# Altium footprint library 03458 401 X215.PcbLib: 1 footprints
Each footprint in its own frame and in the unit in brackets; x right, y up, seen from the top. Pads: shape width x height; smd on the part's side, far side on the other; paste and mask are expansions set on the pad; w line width, h text height; cw(c..) or ccw(c..) is an arc to the next point about the centre after c.
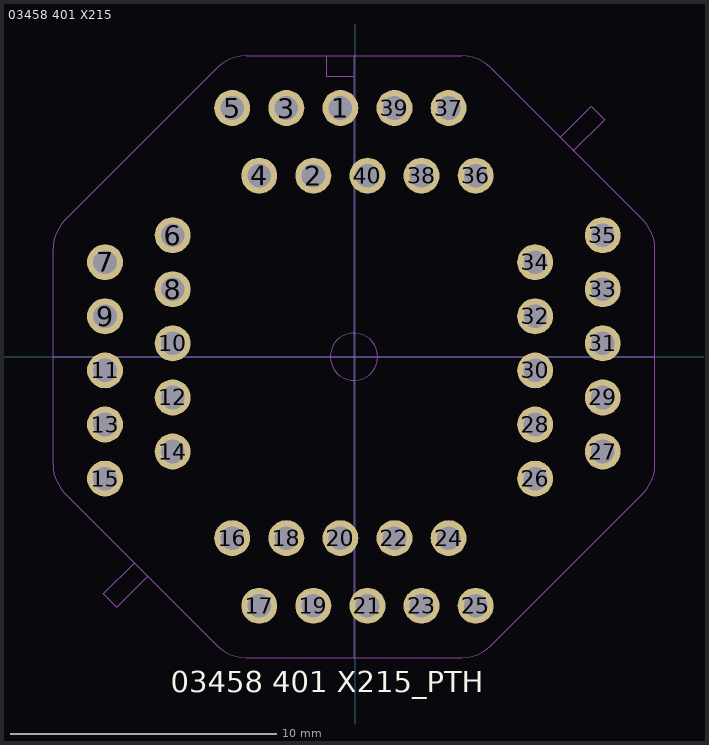
[diagram p0: the footprint, top view; thin cyan lines are the x and y axes]

## 03458 401 X215 [mil]
pads (40):
  round 53.15 hole 35: 1(-22,368) 2(-62,268) 3(-102,368) 4(-142,268) 5(-182,368) 6(-270,180) 7(-370,140) 8(-270,100) 9(-370,60) 10(-270,20) 11(-370,-20) 12(-270,-60) 13(-370,-100) 14(-270,-140) 15(-370,-180) 16(-182,-268) 17(-142,-368) 18(-102,-268) 19(-62,-368) 20(-22,-268) 21(18,-368) 22(58,-268) 23(98,-368) 24(138,-268) 25(178,-368) 26(266,-180) 27(366,-140) 28(266,-100) 29(366,-60) 30(266,-20) 31(366,20) 32(266,60) 33(366,100) 34(266,140) 35(366,180) 36(178,268) 37(138,368) 38(98,268) 39(58,368) 40(18,268)
Top Overlay:
  text "03458 401 X215_PTH" at -273.09,-495.85 h31.5
Mechanical 1:
  circle w0.5: c-369.88,-179.79 r17.5
  circle w0.5: c-369.88,-99.79 r17.5
  circle w0.5: c-369.88,-19.79 r17.5
  circle w0.5: c-369.88,60.21 r17.5
  circle w0.5: c-369.88,140.21 r17.5
  circle w0.5: c-269.88,-139.79 r17.5
  circle w0.5: c-269.88,-59.79 r17.5
  circle w0.5: c-269.88,20.21 r17.5
  circle w0.5: c-269.88,100.21 r17.5
  circle w0.5: c-269.88,180.21 r17.5
  circle w0.5: c-181.88,-267.79 r17.5
  circle w0.5: c-181.88,368.21 r17.5
  circle w0.5: c-141.88,268.21 r17.5
  circle w0.5: c-141.88,-367.79 r17.5
  circle w0.5: c-101.88,368.21 r17.5
  circle w0.5: c-101.88,-267.79 r17.5
  circle w0.5: c-61.88,268.21 r17.5
  circle w0.5: c-61.88,-367.79 r17.5
  circle w0.5: c-21.88,368.21 r17.5
  circle w0.5: c-21.88,-267.79 r17.5
  circle w0.5: c18.12,-367.79 r17.5
  circle w0.5: c18.12,268.21 r17.5
  circle w0.5: c58.12,-267.79 r17.5
  circle w0.5: c58.12,368.21 r17.5
  circle w0.5: c98.12,-367.79 r17.5
  circle w0.5: c98.12,268.21 r17.5
  circle w0.5: c138.12,-267.79 r17.5
  circle w0.5: c138.12,368.21 r17.5
  circle w0.5: c178.12,-367.79 r17.5
  circle w0.5: c178.12,268.21 r17.5
  circle w0.5: c266.12,140.21 r17.5
  circle w0.5: c266.12,60.21 r17.5
  circle w0.5: c266.12,-19.79 r17.5
  circle w0.5: c266.12,-99.79 r17.5
  circle w0.5: c266.12,-179.79 r17.5
  circle w0.5: c366.12,180.21 r17.5
  circle w0.5: c366.12,100.21 r17.5
  circle w0.5: c366.12,20.21 r17.5
  circle w0.5: c366.12,-59.79 r17.5
  circle w0.5: c366.12,-139.79 r17.5
Mechanical 2:
  lines w0.5: -446.88,0.21 443.12,0.21 ; -1.88,-444.79 -1.88,445.21
Mechanical 3:
  circle w0.5: c-1.88,0.21 r35
  lines w0.5: -326.44,-304.55 -372.4,-350.51 -352.6,-370.31 -306.64,-324.35 ; 302.88,324.77 348.85,370.73 368.64,350.94 322.68,304.97 ; -446.88,-159.26 ccw(c-386.88,-159.26) -429.31,-201.69 -203.78,-427.22 ccw(c-161.35,-384.79) -161.35,-444.79 157.59,-444.79 ccw(c157.59,-384.79) 200.02,-427.22 425.55,-201.69 ccw(c383.12,-159.26) 443.12,-159.26 443.12,159.68 ccw(c383.12,159.68) 425.55,202.11 200.02,427.64 ccw(c157.59,385.21) 157.59,445.21 -161.35,445.21 ccw(c-161.35,385.21) -203.78,427.64 -429.31,202.11 ccw(c-386.88,159.68) -446.88,159.68 -446.88,-159.26 ; -41.88,415.21 -41.88,445.21 -1.88,445.21 -1.88,415.21 -41.88,415.21
Top Courtyard:
  lines w0.5: -326.44,-304.55 -372.4,-350.51 -352.6,-370.31 -306.64,-324.35 ; 302.88,324.77 348.85,370.73 368.64,350.94 322.68,304.97 ; -446.88,-159.26 ccw(c-386.88,-159.26) -429.31,-201.69 -203.78,-427.22 ccw(c-161.35,-384.79) -161.35,-444.79 157.59,-444.79 ccw(c157.59,-384.79) 200.02,-427.22 425.55,-201.69 ccw(c383.12,-159.26) 443.12,-159.26 443.12,159.68 ccw(c383.12,159.68) 425.55,202.11 200.02,427.64 ccw(c157.59,385.21) 157.59,445.21 -161.35,445.21 ccw(c-161.35,385.21) -203.78,427.64 -429.31,202.11 ccw(c-386.88,159.68) -446.88,159.68 -446.88,-159.26 ; -41.88,415.21 -41.88,445.21 -1.88,445.21 -1.88,415.21 -41.88,415.21